# Altium footprint library WIRE_Solder_8AWG.PcbLib: 1 footprints
Each footprint in its own frame and in the unit in brackets; x right, y up, seen from the top. Pads: shape width x height; smd on the part's side, far side on the other; paste and mask are expansions set on the pad; w line width, h text height; cw(c..) or ccw(c..) is an arc to the next point about the centre after c.
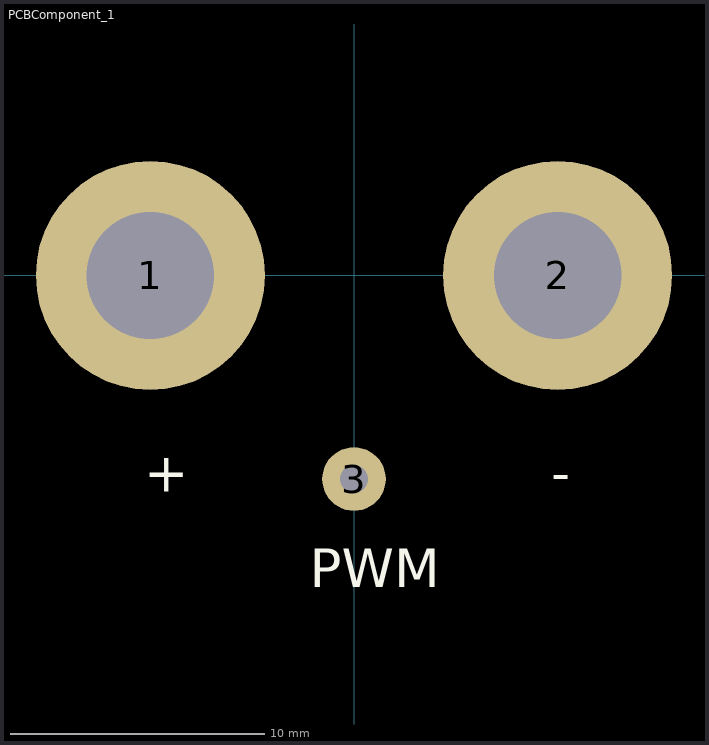
[diagram p0: the footprint, top view; thin cyan lines are the x and y axes]

## PCBComponent_1 [mm]
pads (3):
  round 9 hole 5: 1(-8,0) 2(8,0)
  round 2.5 hole 1.1: 3(0,-8)
Top Overlay:
  text "PWM" at -1.746,-12.246 h1.52
  text "-" at 7.754,-8.508 h1.52
  text "+" at -8.246,-8.5 h1.52